# Altium footprint library WR-MPC3.PcbLib: 235 footprints (part 7 of 15)
Each footprint in its own frame and in the unit in brackets; x right, y up, seen from the top. Pads: shape width x height; smd on the part's side, far side on the other; paste and mask are expansions set on the pad; w line width, h text height; cw(c..) or ccw(c..) is an arc to the next point about the centre after c.
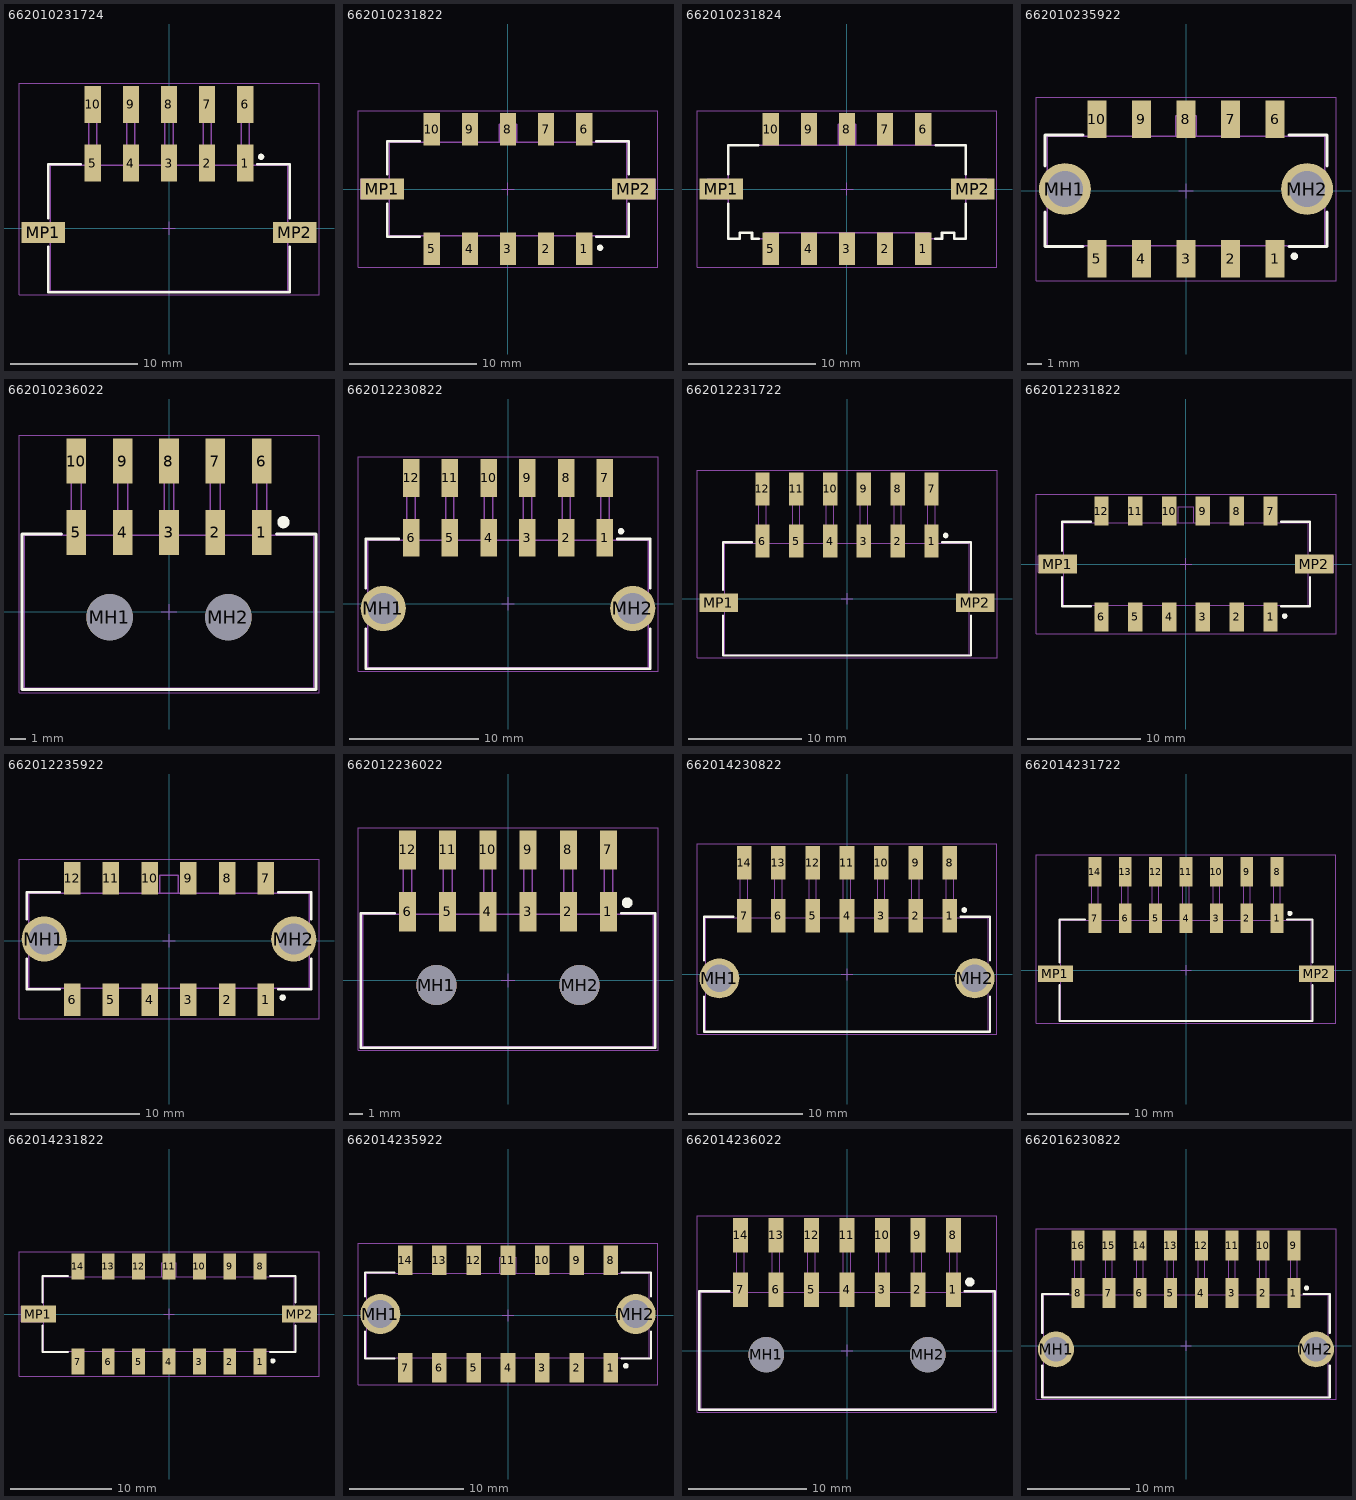
[diagram p6: the footprints below, top view; thin cyan lines are the x and y axes]

## 662010231724 [mm] "3.00mm SMT Male Dual Row Angled Header with SMT Solder Tab, 10p"
height 8.26
pads (12):
  rect 1.27x2.92 smd: 1(6,5.13) 2(3,5.13) 3(0,5.13) 4(-3,5.13) 5(-6,5.13) 6(6,9.75) 7(3,9.75) 8(0,9.75) 9(-3,9.75) 10(-6,9.75)
  rect 3.43x1.65 smd: MP1(-9.895,-0.35) MP2(9.895,-0.35)
Top Overlay:
  circle w0.25: c7.25,5.625 r0.125
  lines w0.2: -9.5,-1.475 -9.5,-5.025 9.5,-5.025 9.5,-1.475 ; -9.5,0.775 -9.5,5.025 -6.95,5.025 ; 6.95,5.025 9.5,5.025 9.5,0.775
Top Designator:
  text ".Designator" at -7.498,-0.5 h1.5
Top Component Outline:
  lines w0.1: -9.35,-1.1 -11.05,-1.1 -11.05,0.4 -9.35,0.4 ; -6.32,4.95 -6.32,10.95 -5.68,10.95 -5.68,4.95 ; -6.32,6.3 -5.68,6.3 ; -3.32,4.95 -3.32,10.95 -2.68,10.95 -2.68,4.95 ; -3.32,6.3 -2.68,6.3 ; -0.32,4.95 -0.32,10.95 0.32,10.95 0.32,4.95 ; -0.32,6.3 0.32,6.3 ; 2.68,4.95 2.68,10.95 3.32,10.95 3.32,4.95 ; 2.68,6.3 3.32,6.3 ; 5.68,4.95 5.68,10.95 6.32,10.95 6.32,4.95 ; 5.68,6.3 6.32,6.3 ; 9.35,-1.1 11.05,-1.1 11.05,0.4 9.35,0.4 ; -9.35,-4.95 -9.35,4.95 9.35,4.95 9.35,-4.95 -9.35,-4.95
Top 3D Body:
  lines w0.1: -9.35,-1.1 -11.05,-1.1 -11.05,0.4 -9.35,0.4 ; -6.32,4.95 -6.32,10.95 -5.68,10.95 -5.68,4.95 ; -6.32,6.3 -5.68,6.3 ; -3.32,4.95 -3.32,10.95 -2.68,10.95 -2.68,4.95 ; -3.32,6.3 -2.68,6.3 ; -0.32,4.95 -0.32,10.95 0.32,10.95 0.32,4.95 ; -0.32,6.3 0.32,6.3 ; 2.68,4.95 2.68,10.95 3.32,10.95 3.32,4.95 ; 2.68,6.3 3.32,6.3 ; 5.68,4.95 5.68,10.95 6.32,10.95 6.32,4.95 ; 5.68,6.3 6.32,6.3 ; 9.35,-1.1 11.05,-1.1 11.05,0.4 9.35,0.4 ; -9.35,-4.95 9.35,-4.95 9.35,4.95 -9.35,4.95 -9.35,-4.95
Top Courtyard:
  lines w0.05: -11.81,-5.225 11.81,-5.225 11.81,11.41 -11.81,11.41 -11.81,-5.225
Top Component Center:
  lines w0.05: -0.5,0 0.5,0 ; 0,-0.5 0,0.5
3D body "662010231724.stp": height 8.76, standoff 0, extent -11.05,-4.95 11.05,10.95

## 662010231822 [mm] "3.00mm SMT Male Dual Row Vertical Header with SMT Solder Tab, 10p"
height 9.9
pads (12):
  rect 1.27x2.54 smd: 1(6,-4.7) 2(3,-4.7) 3(0,-4.7) 4(-3,-4.7) 5(-6,-4.7) 6(6,4.7) 7(3,4.7) 8(0,4.7) 9(-3,4.7) 10(-6,4.7)
  rect 3.43x1.65 smd: MP1(-9.895,0) MP2(9.895,0)
Top Overlay:
  circle w0.25: c7.25,-4.625 r0.125
  lines w0.2: -9.5,-1.155 -9.5,-3.755 -6.95,-3.755 ; -9.5,1.155 -9.5,3.755 -6.95,3.755 ; 6.95,-3.755 9.5,-3.755 9.5,-1.155 ; 6.95,3.755 9.5,3.755 9.5,1.155
Top Designator:
  text ".Designator" at -7.498,-0.5 h1.5
Top Component Outline:
  lines w0.1: -9.35,-0.75 -11.6,-0.75 -11.6,0.75 -9.35,0.75 ; -6.32,-3.68 -6.32,-5.698 -5.68,-5.698 -5.68,-3.68 ; -6.32,3.68 -6.32,5.698 -5.68,5.698 -5.68,3.68 ; -3.32,-3.68 -3.32,-5.698 -2.68,-5.698 -2.68,-3.68 ; -3.32,3.68 -3.32,5.698 -2.68,5.698 -2.68,3.68 ; -0.7,3.68 -0.7,5.08 0.7,5.08 0.7,3.68 ; -0.32,-3.68 -0.32,-5.698 0.32,-5.698 0.32,-3.68 ; -0.32,3.68 -0.32,5.698 0.32,5.698 0.32,3.68 ; 2.68,-3.68 2.68,-5.698 3.32,-5.698 3.32,-3.68 ; 2.68,3.68 2.68,5.698 3.32,5.698 3.32,3.68 ; 5.68,-3.68 5.68,-5.698 6.32,-5.698 6.32,-3.68 ; 5.68,3.68 5.68,5.698 6.32,5.698 6.32,3.68 ; 9.35,-0.75 11.6,-0.75 11.6,0.75 9.35,0.75 ; -9.35,-3.68 9.35,-3.68 9.35,3.68 -9.35,3.68 -9.35,-3.68
Top 3D Body:
  lines w0.1: -9.35,-0.75 -11.6,-0.75 -11.6,0.75 -9.35,0.75 ; -6.32,-3.68 -6.32,-5.698 -5.68,-5.698 -5.68,-3.68 ; -6.32,3.68 -6.32,5.698 -5.68,5.698 -5.68,3.68 ; -3.32,-3.68 -3.32,-5.698 -2.68,-5.698 -2.68,-3.68 ; -3.32,3.68 -3.32,5.698 -2.68,5.698 -2.68,3.68 ; -0.7,3.68 -0.7,5.08 0.7,5.08 0.7,3.68 ; -0.32,-3.68 -0.32,-5.698 0.32,-5.698 0.32,-3.68 ; -0.32,3.68 -0.32,5.698 0.32,5.698 0.32,3.68 ; 2.68,-3.68 2.68,-5.698 3.32,-5.698 3.32,-3.68 ; 2.68,3.68 2.68,5.698 3.32,5.698 3.32,3.68 ; 5.68,-3.68 5.68,-5.698 6.32,-5.698 6.32,-3.68 ; 5.68,3.68 5.68,5.698 6.32,5.698 6.32,3.68 ; 9.35,-0.75 11.6,-0.75 11.6,0.75 9.35,0.75 ; -9.35,-3.68 9.35,-3.68 9.35,3.68 -9.35,3.68 -9.35,-3.68
Top Courtyard:
  lines w0.05: -11.81,-6.17 -11.81,6.17 11.81,6.17 11.81,-6.17 -11.81,-6.17
Top Component Center:
  lines w0.05: -0.5,0 0.5,0 ; 0,-0.5 0,0.5
3D body "662010231822.stp": height 9.93, standoff 0.03, extent -11.6,-5.698 11.6,5.698

## 662010231824 [mm] "3.00mm SMT Male Dual Row Vertical Header with SMT Solder Tab, 10p"
height 9.9
pads (12):
  rect 1.27x2.54 smd: 1(6,-4.7) 2(3,-4.7) 3(0,-4.7) 4(-3,-4.7) 5(-6,-4.7) 6(6,4.7) 7(3,4.7) 8(0,4.7) 9(-3,4.7) 10(-6,4.7)
  rect 3.43x1.65 smd: MP1(-9.895,0) MP2(9.895,0)
Top Overlay:
  lines w0.2: -9.35,-1.17 -9.35,-3.93 -8.45,-3.93 -8.45,-3.43 -7.48,-3.43 -7.48,-3.93 -6.95,-3.93 ; -9.35,1.18 -9.35,3.43 -7.003,3.43 ; 6.95,-3.93 7.48,-3.93 7.48,-3.43 8.45,-3.43 8.45,-3.93 9.35,-3.93 9.35,-1.17 ; 7.003,3.43 9.35,3.43 9.35,1.18
Top Designator:
  text ".Designator" at -7.498,-0.5 h1.5
Top Component Outline:
  lines w0.1: -9.35,-0.75 -11.05,-0.75 -11.05,0.75 -9.35,0.75 ; -6.32,-3.43 -6.32,-5.698 -5.68,-5.698 -5.68,-3.43 ; -6.32,3.43 -6.32,5.698 -5.68,5.698 -5.68,3.43 ; -3.32,-3.43 -3.32,-5.698 -2.68,-5.698 -2.68,-3.43 ; -3.32,3.43 -3.32,5.698 -2.68,5.698 -2.68,3.43 ; -0.7,3.43 -0.7,5.08 0.7,5.08 0.7,3.43 ; -0.32,-3.43 -0.32,-5.698 0.32,-5.698 0.32,-3.43 ; -0.32,3.43 -0.32,5.698 0.32,5.698 0.32,3.43 ; 2.68,-3.43 2.68,-5.698 3.32,-5.698 3.32,-3.43 ; 2.68,3.43 2.68,5.698 3.32,5.698 3.32,3.43 ; 5.68,-3.43 5.68,-5.698 6.32,-5.698 6.32,-3.43 ; 5.68,3.43 5.68,5.698 6.32,5.698 6.32,3.43 ; 9.35,-0.75 11.05,-0.75 11.05,0.75 9.35,0.75 ; -9.35,-3.93 -9.35,3.43 9.35,3.43 9.35,-3.93 8.45,-3.93 8.45,-3.43 7.48,-3.43 7.48,-3.93 6.48,-3.93 6.48,-3.43 -6.48,-3.43 -6.48,-3.93 -7.48,-3.93 -7.48,-3.43 -8.45,-3.43 -8.45,-3.93 -9.35,-3.93
Top Courtyard:
  lines w0.05: -11.81,-6.17 11.81,-6.17 11.81,6.17 -11.81,6.17 -11.81,-6.17
Top Component Center:
  lines w0.05: -0.5,0 0.5,0 ; 0,-0.5 0,0.5
3D body "662010231824.stp": height 9.93, standoff 0.03, extent -11.045,-5.698 11.045,5.698

## 662010235922 [mm] "Dual row SMT Vertical header With TH metal clip 10p"
height 9.9
pads (12):
  rect 1.27x2.54 smd: 1(6,-4.57) 2(3,-4.57) 3(0,-4.57) 4(-3,-4.57) 5(-6,-4.57) 6(6,4.83) 7(3,4.83) 8(0,4.83) 9(-3,4.83) 10(-6,4.83)
  round 3.5 hole 2.41: MH1(-8.16,0.13) MH2(8.16,0.13)
Top Overlay:
  circle w0.25: c7.3,-4.4 r0.125
  lines w0.2: -9.5,-1.405 -9.5,-3.755 -6.95,-3.755 ; -9.5,1.665 -9.5,3.755 -6.95,3.755 ; 6.95,-3.755 9.5,-3.755 9.5,-1.405 ; 6.95,3.755 9.5,3.755 9.5,1.665
Top Designator:
  text ".Designator" at -7.498,-0.5 h1.5
Top Component Outline:
  lines w0.1: -6.32,-3.68 -6.32,-5.5 -5.68,-5.5 -5.68,-3.68 ; -6.32,3.68 -6.32,5.9 -5.68,5.9 -5.68,3.68 ; -3.32,-3.68 -3.32,-5.5 -2.68,-5.5 -2.68,-3.68 ; -3.32,3.68 -3.32,5.9 -2.68,5.9 -2.68,3.68 ; -0.7,3.68 -0.7,5.08 0.7,5.08 0.7,3.68 ; -0.32,-3.68 -0.32,-5.5 0.32,-5.5 0.32,-3.68 ; -0.32,3.68 -0.32,5.9 0.32,5.9 0.32,3.68 ; 2.68,-3.68 2.68,-5.5 3.32,-5.5 3.32,-3.68 ; 2.68,3.68 2.68,5.9 3.32,5.9 3.32,3.68 ; 5.68,-3.68 5.68,-5.5 6.32,-5.5 6.32,-3.68 ; 5.68,3.68 5.68,5.9 6.32,5.9 6.32,3.68 ; -9.35,-3.68 -9.35,3.68 9.35,3.68 9.35,-3.68 -9.35,-3.68
Top 3D Body:
  lines w0.1: -6.32,-3.68 -6.32,-5.5 -5.68,-5.5 -5.68,-3.68 ; -6.32,3.68 -6.32,5.9 -5.68,5.9 -5.68,3.68 ; -3.32,-3.68 -3.32,-5.5 -2.68,-5.5 -2.68,-3.68 ; -3.32,3.68 -3.32,5.9 -2.68,5.9 -2.68,3.68 ; -0.7,3.68 -0.7,5.08 0.7,5.08 0.7,3.68 ; -0.32,-3.68 -0.32,-5.5 0.32,-5.5 0.32,-3.68 ; -0.32,3.68 -0.32,5.9 0.32,5.9 0.32,3.68 ; 2.68,-3.68 2.68,-5.5 3.32,-5.5 3.32,-3.68 ; 2.68,3.68 2.68,5.9 3.32,5.9 3.32,3.68 ; 5.68,-3.68 5.68,-5.5 6.32,-5.5 6.32,-3.68 ; 5.68,3.68 5.68,5.9 6.32,5.9 6.32,3.68 ; -9.35,-3.68 -9.35,3.68 9.35,3.68 9.35,-3.68 -9.35,-3.68
Top Courtyard:
  lines w0.05: -10.11,-6.04 -10.11,6.3 10.11,6.3 10.11,-6.04 -10.11,-6.04
Top Component Center:
  lines w0.05: -0.5,0 0.5,0 ; 0,-0.5 0,0.5
3D body "662010235922.stp": height 9.92, standoff -3.08, extent -9.35,-5.5 9.35,5.9

## 662010236022 [mm] "3.00mm SMT Male Dual Row Angled Header with Plastic Pegs, 10p"
height 8.26
pads (12):
  rect 1.27x2.92 smd: 1(6,5.13) 2(3,5.13) 3(0,5.13) 4(-3,5.13) 5(-6,5.13) 6(6,9.75) 7(3,9.75) 8(0,9.75) 9(-3,9.75) 10(-6,9.75)
  round 3 hole 3 unplated: MH1(-3.84,-0.35) MH2(3.84,-0.35)
Top Overlay:
  circle w0.4: c7.4,5.8 r0.2
  lines w0.2: -6.95,5.025 -9.5,5.025 -9.5,-5.025 9.5,-5.025 9.5,5.025 6.95,5.025
Top Designator:
  text ".Designator" at -7.498,-0.5 h1.5
Top Component Outline:
  lines w0.1: -6.32,4.95 -6.32,10.95 -5.68,10.95 -5.68,4.95 ; -6.32,6.3 -5.68,6.3 ; -3.32,4.95 -3.32,10.95 -2.68,10.95 -2.68,4.95 ; -3.32,6.3 -2.68,6.3 ; -0.32,4.95 -0.32,10.95 0.32,10.95 0.32,4.95 ; -0.32,6.3 0.32,6.3 ; 2.68,4.95 2.68,10.95 3.32,10.95 3.32,4.95 ; 2.68,6.3 3.32,6.3 ; 5.68,4.95 5.68,10.95 6.32,10.95 6.32,4.95 ; 5.68,6.3 6.32,6.3 ; -9.35,-4.95 9.35,-4.95 9.35,4.95 -9.35,4.95 -9.35,-4.95
Top 3D Body:
  lines w0.1: -6.32,4.95 -6.32,10.95 -5.68,10.95 -5.68,4.95 ; -6.32,6.3 -5.68,6.3 ; -3.32,4.95 -3.32,10.95 -2.68,10.95 -2.68,4.95 ; -3.32,6.3 -2.68,6.3 ; -0.32,4.95 -0.32,10.95 0.32,10.95 0.32,4.95 ; -0.32,6.3 0.32,6.3 ; 2.68,4.95 2.68,10.95 3.32,10.95 3.32,4.95 ; 2.68,6.3 3.32,6.3 ; 5.68,4.95 5.68,10.95 6.32,10.95 6.32,4.95 ; 5.68,6.3 6.32,6.3 ; -9.35,-4.95 9.35,-4.95 9.35,4.95 -9.35,4.95 -9.35,-4.95
Top Courtyard:
  lines w0.05: -9.7,-5.225 9.7,-5.225 9.7,11.41 -9.7,11.41 -9.7,-5.225
Top Component Center:
  lines w0.05: -0.5,0 0.5,0 ; 0,-0.5 0,0.5
3D body "662010236022.stp": height 8.79, standoff -3.17, extent -9.35,-4.95 9.35,10.95

## 662012230822 [mm] "Dual row SMT Right angle header With TH Metal Clip 12p"
height 8.76
pads (14):
  rect 1.27x2.92 smd: 1(7.5,5.13) 2(4.5,5.13) 3(1.5,5.13) 4(-1.5,5.13) 5(-4.5,5.13) 6(-7.5,5.13) 7(7.5,9.75) 8(4.5,9.75) 9(1.5,9.75) 10(-1.5,9.75) 11(-4.5,9.75) 12(-7.5,9.75)
  round 3.5 hole 2.41: MH1(-9.66,-0.35) MH2(9.66,-0.35)
Top Overlay:
  circle w0.25: c8.75,5.625 r0.125
  lines w0.2: -11,-1.925 -11,-5.025 11,-5.025 11,-1.925 ; -11,1.225 -11,5.025 -8.45,5.025 ; 8.45,5.025 11,5.025 11,1.225
Top Designator:
  text ".Designator" at -7.498,-0.5 h1.5
Top Component Outline:
  lines w0.1: -7.82,4.95 -7.82,10.95 -7.18,10.95 -7.18,4.95 ; -7.82,6.3 -7.18,6.3 ; -4.82,4.95 -4.82,10.95 -4.18,10.95 -4.18,4.95 ; -4.82,6.3 -4.18,6.3 ; -1.82,4.95 -1.82,10.95 -1.18,10.95 -1.18,4.95 ; -1.82,6.3 -1.18,6.3 ; 1.18,4.95 1.18,10.95 1.82,10.95 1.82,4.95 ; 1.18,6.3 1.82,6.3 ; 4.18,4.95 4.18,10.95 4.82,10.95 4.82,4.95 ; 4.18,6.3 4.82,6.3 ; 7.18,4.95 7.18,10.95 7.82,10.95 7.82,4.95 ; 7.18,6.3 7.82,6.3 ; -10.85,-4.95 -10.85,4.95 10.85,4.95 10.85,-4.95 -10.85,-4.95
Top 3D Body:
  lines w0.1: -7.82,4.95 -7.82,10.95 -7.18,10.95 -7.18,4.95 ; -7.82,6.3 -7.18,6.3 ; -4.82,4.95 -4.82,10.95 -4.18,10.95 -4.18,4.95 ; -4.82,6.3 -4.18,6.3 ; -1.82,4.95 -1.82,10.95 -1.18,10.95 -1.18,4.95 ; -1.82,6.3 -1.18,6.3 ; 1.18,4.95 1.18,10.95 1.82,10.95 1.82,4.95 ; 1.18,6.3 1.82,6.3 ; 4.18,4.95 4.18,10.95 4.82,10.95 4.82,4.95 ; 4.18,6.3 4.82,6.3 ; 7.18,4.95 7.18,10.95 7.82,10.95 7.82,4.95 ; 7.18,6.3 7.82,6.3 ; -10.85,-4.95 -10.85,4.95 10.85,4.95 10.85,-4.95 -10.85,-4.95
Top Courtyard:
  lines w0.05: -11.61,-5.225 11.61,-5.225 11.61,11.41 -11.61,11.41 -11.61,-5.225
Top Component Center:
  lines w0.05: -0.5,0 0.5,0 ; 0,-0.5 0,0.5
3D body "662012230822.stp": height 8.78, standoff -3.08, extent -10.85,-4.95 10.85,10.95

## 662012231722 [mm] "3.00mm SMT Male Dual Row Angled Header with SMT Solder Tab, 12p"
height 8.26
pads (14):
  rect 1.27x2.92 smd: 1(7.5,5.13) 2(4.5,5.13) 3(1.5,5.13) 4(-1.5,5.13) 5(-4.5,5.13) 6(-7.5,5.13) 7(7.5,9.75) 8(4.5,9.75) 9(1.5,9.75) 10(-1.5,9.75) 11(-4.5,9.75) 12(-7.5,9.75)
  rect 3.43x1.65 smd: MP1(-11.395,-0.35) MP2(11.395,-0.35)
Top Overlay:
  circle w0.25: c8.75,5.625 r0.125
  lines w0.2: -11,-1.475 -11,-5.025 11,-5.025 11,-1.475 ; -11,0.775 -11,5.025 -8.45,5.025 ; 8.45,5.025 11,5.025 11,0.775
Top Designator:
  text ".Designator" at -7.498,-0.5 h1.5
Top Component Outline:
  lines w0.1: -10.85,-1.1 -12.55,-1.1 -12.55,0.4 -10.85,0.4 ; -7.82,4.95 -7.82,10.95 -7.18,10.95 -7.18,4.95 ; -7.82,6.3 -7.18,6.3 ; -4.82,4.95 -4.82,10.95 -4.18,10.95 -4.18,4.95 ; -4.82,6.3 -4.18,6.3 ; -1.82,4.95 -1.82,10.95 -1.18,10.95 -1.18,4.95 ; -1.82,6.3 -1.18,6.3 ; 1.18,4.95 1.18,10.95 1.82,10.95 1.82,4.95 ; 1.18,6.3 1.82,6.3 ; 4.18,4.95 4.18,10.95 4.82,10.95 4.82,4.95 ; 4.18,6.3 4.82,6.3 ; 7.18,4.95 7.18,10.95 7.82,10.95 7.82,4.95 ; 7.18,6.3 7.82,6.3 ; 10.85,-1.1 12.55,-1.1 12.55,0.4 10.85,0.4 ; -10.85,-4.95 10.85,-4.95 10.85,4.95 -10.85,4.95 -10.85,-4.95
Top 3D Body:
  lines w0.1: -10.85,-1.1 -12.55,-1.1 -12.55,0.4 -10.85,0.4 ; -7.82,4.95 -7.82,10.95 -7.18,10.95 -7.18,4.95 ; -7.82,6.3 -7.18,6.3 ; -4.82,4.95 -4.82,10.95 -4.18,10.95 -4.18,4.95 ; -4.82,6.3 -4.18,6.3 ; -1.82,4.95 -1.82,10.95 -1.18,10.95 -1.18,4.95 ; -1.82,6.3 -1.18,6.3 ; 1.18,4.95 1.18,10.95 1.82,10.95 1.82,4.95 ; 1.18,6.3 1.82,6.3 ; 4.18,4.95 4.18,10.95 4.82,10.95 4.82,4.95 ; 4.18,6.3 4.82,6.3 ; 7.18,4.95 7.18,10.95 7.82,10.95 7.82,4.95 ; 7.18,6.3 7.82,6.3 ; 10.85,-1.1 12.55,-1.1 12.55,0.4 10.85,0.4 ; -10.85,-4.95 10.85,-4.95 10.85,4.95 -10.85,4.95 -10.85,-4.95
Top Courtyard:
  lines w0.05: -13.31,-5.225 13.31,-5.225 13.31,11.41 -13.31,11.41 -13.31,-5.225
Top Component Center:
  lines w0.05: -0.5,0 0.5,0 ; 0,-0.5 0,0.5
3D body "662012231722.stp": height 8.79, standoff 0.03, extent -12.55,-4.95 12.55,10.95

## 662012231822 [mm] "3.00mm SMT Male Dual Row Vertical Header with SMT Solder Tab, 12p"
height 9.9
pads (14):
  rect 1.27x2.54 smd: 1(7.5,-4.7) 2(4.5,-4.7) 3(1.5,-4.7) 4(-1.5,-4.7) 5(-4.5,-4.7) 6(-7.5,-4.7) 7(7.5,4.7) 8(4.5,4.7) 9(1.5,4.7) 10(-1.5,4.7) 11(-4.5,4.7) 12(-7.5,4.7)
  rect 3.43x1.65 smd: MP1(-11.395,0) MP2(11.395,0)
Top Overlay:
  circle w0.25: c8.75,-4.625 r0.125
  lines w0.2: -11,-1.155 -11,-3.755 -8.45,-3.755 ; -11,1.155 -11,3.755 -8.45,3.755 ; 8.45,-3.755 11,-3.755 11,-1.155 ; 8.45,3.755 11,3.755 11,1.155
Top Designator:
  text ".Designator" at -7.498,-0.5 h1.5
Top Component Outline:
  lines w0.1: -10.85,-0.75 -13.1,-0.75 -13.1,0.75 -10.85,0.75 ; -7.82,-3.68 -7.82,-5.698 -7.18,-5.698 -7.18,-3.68 ; -7.82,3.68 -7.82,5.698 -7.18,5.698 -7.18,3.68 ; -4.82,-3.68 -4.82,-5.698 -4.18,-5.698 -4.18,-3.68 ; -4.82,3.68 -4.82,5.698 -4.18,5.698 -4.18,3.68 ; -1.82,-3.68 -1.82,-5.698 -1.18,-5.698 -1.18,-3.68 ; -1.82,3.68 -1.82,5.698 -1.18,5.698 -1.18,3.68 ; -0.7,3.68 -0.7,5.08 0.7,5.08 0.7,3.68 ; 1.18,-3.68 1.18,-5.698 1.82,-5.698 1.82,-3.68 ; 1.18,3.68 1.18,5.698 1.82,5.698 1.82,3.68 ; 4.18,-3.68 4.18,-5.698 4.82,-5.698 4.82,-3.68 ; 4.18,3.68 4.18,5.698 4.82,5.698 4.82,3.68 ; 7.18,-3.68 7.18,-5.698 7.82,-5.698 7.82,-3.68 ; 7.18,3.68 7.18,5.698 7.82,5.698 7.82,3.68 ; 10.85,-0.75 13.1,-0.75 13.1,0.75 10.85,0.75 ; -10.85,-3.68 10.85,-3.68 10.85,3.68 -10.85,3.68 -10.85,-3.68
Top 3D Body:
  lines w0.1: -10.85,-0.75 -13.1,-0.75 -13.1,0.75 -10.85,0.75 ; -7.82,-3.68 -7.82,-5.698 -7.18,-5.698 -7.18,-3.68 ; -7.82,3.68 -7.82,5.698 -7.18,5.698 -7.18,3.68 ; -4.82,-3.68 -4.82,-5.698 -4.18,-5.698 -4.18,-3.68 ; -4.82,3.68 -4.82,5.698 -4.18,5.698 -4.18,3.68 ; -1.82,-3.68 -1.82,-5.698 -1.18,-5.698 -1.18,-3.68 ; -1.82,3.68 -1.82,5.698 -1.18,5.698 -1.18,3.68 ; -0.7,3.68 -0.7,5.08 0.7,5.08 0.7,3.68 ; 1.18,-3.68 1.18,-5.698 1.82,-5.698 1.82,-3.68 ; 1.18,3.68 1.18,5.698 1.82,5.698 1.82,3.68 ; 4.18,-3.68 4.18,-5.698 4.82,-5.698 4.82,-3.68 ; 4.18,3.68 4.18,5.698 4.82,5.698 4.82,3.68 ; 7.18,-3.68 7.18,-5.698 7.82,-5.698 7.82,-3.68 ; 7.18,3.68 7.18,5.698 7.82,5.698 7.82,3.68 ; 10.85,-0.75 13.1,-0.75 13.1,0.75 10.85,0.75 ; -10.85,-3.68 10.85,-3.68 10.85,3.68 -10.85,3.68 -10.85,-3.68
Top Courtyard:
  lines w0.05: -13.31,-6.17 -13.31,6.17 13.31,6.17 13.31,-6.17 -13.31,-6.17
Top Component Center:
  lines w0.05: -0.5,0 0.5,0 ; 0,-0.5 0,0.5
3D body "662012231822.stp": height 9.93, standoff 0.03, extent -13.1,-5.698 13.1,5.698

## 662012235922 [mm] "Dual row SMT Vertical header With TH metal clip 12p"
height 9.9
pads (14):
  rect 1.27x2.54 smd: 1(7.5,-4.57) 2(4.5,-4.57) 3(1.5,-4.57) 4(-1.5,-4.57) 5(-4.5,-4.57) 6(-7.5,-4.57) 7(7.5,4.83) 8(4.5,4.83) 9(1.5,4.83) 10(-1.5,4.83) 11(-4.5,4.83) 12(-7.5,4.83)
  round 3.5 hole 2.41: MH1(-9.66,0.13) MH2(9.66,0.13)
Top Overlay:
  circle w0.25: c8.8,-4.4 r0.125
  lines w0.2: -11,-1.405 -11,-3.755 -8.45,-3.755 ; -11,1.665 -11,3.755 -8.45,3.755 ; 8.45,-3.755 11,-3.755 11,-1.405 ; 8.45,3.755 11,3.755 11,1.665
Top Designator:
  text ".Designator" at -7.498,-0.5 h1.5
Top Component Outline:
  lines w0.1: -7.82,-3.68 -7.82,-5.5 -7.18,-5.5 -7.18,-3.68 ; -7.82,3.68 -7.82,5.9 -7.18,5.9 -7.18,3.68 ; -4.82,-3.68 -4.82,-5.5 -4.18,-5.5 -4.18,-3.68 ; -4.82,3.68 -4.82,5.9 -4.18,5.9 -4.18,3.68 ; -1.82,-3.68 -1.82,-5.5 -1.18,-5.5 -1.18,-3.68 ; -1.82,3.68 -1.82,5.9 -1.18,5.9 -1.18,3.68 ; -0.7,3.68 -0.7,5.08 0.7,5.08 0.7,3.68 ; 1.18,-3.68 1.18,-5.5 1.82,-5.5 1.82,-3.68 ; 1.18,3.68 1.18,5.9 1.82,5.9 1.82,3.68 ; 4.18,-3.68 4.18,-5.5 4.82,-5.5 4.82,-3.68 ; 4.18,3.68 4.18,5.9 4.82,5.9 4.82,3.68 ; 7.18,-3.68 7.18,-5.5 7.82,-5.5 7.82,-3.68 ; 7.18,3.68 7.18,5.9 7.82,5.9 7.82,3.68 ; -10.85,-3.68 -10.85,3.68 10.85,3.68 10.85,-3.68 -10.85,-3.68
Top 3D Body:
  lines w0.1: -7.82,-3.68 -7.82,-5.5 -7.18,-5.5 -7.18,-3.68 ; -7.82,3.68 -7.82,5.9 -7.18,5.9 -7.18,3.68 ; -4.82,-3.68 -4.82,-5.5 -4.18,-5.5 -4.18,-3.68 ; -4.82,3.68 -4.82,5.9 -4.18,5.9 -4.18,3.68 ; -1.82,-3.68 -1.82,-5.5 -1.18,-5.5 -1.18,-3.68 ; -1.82,3.68 -1.82,5.9 -1.18,5.9 -1.18,3.68 ; -0.7,3.68 -0.7,5.08 0.7,5.08 0.7,3.68 ; 1.18,-3.68 1.18,-5.5 1.82,-5.5 1.82,-3.68 ; 1.18,3.68 1.18,5.9 1.82,5.9 1.82,3.68 ; 4.18,-3.68 4.18,-5.5 4.82,-5.5 4.82,-3.68 ; 4.18,3.68 4.18,5.9 4.82,5.9 4.82,3.68 ; 7.18,-3.68 7.18,-5.5 7.82,-5.5 7.82,-3.68 ; 7.18,3.68 7.18,5.9 7.82,5.9 7.82,3.68 ; -10.85,-3.68 10.85,-3.68 10.85,3.68 -10.85,3.68 -10.85,-3.68
Top Courtyard:
  lines w0.05: -11.61,-6.04 11.61,-6.04 11.61,6.3 -11.61,6.3 -11.61,-6.04
Top Component Center:
  lines w0.05: -0.5,0 0.5,0 ; 0,-0.5 0,0.5
3D body "662012235922.stp": height 9.92, standoff -3.08, extent -10.85,-5.5 10.85,5.9

## 662012236022 [mm] "3.00mm SMT Male Dual Row Angled Header with Plastic Pegs, 12p"
height 8.26
pads (14):
  rect 1.27x2.92 smd: 1(7.5,5.13) 2(4.5,5.13) 3(1.5,5.13) 4(-1.5,5.13) 5(-4.5,5.13) 6(-7.5,5.13) 7(7.5,9.75) 8(4.5,9.75) 9(1.5,9.75) 10(-1.5,9.75) 11(-4.5,9.75) 12(-7.5,9.75)
  round 3 hole 3 unplated: MH1(-5.34,-0.35) MH2(5.34,-0.35)
Top Overlay:
  circle w0.4: c8.9,5.8 r0.2
  lines w0.2: -8.45,5.025 -11,5.025 -11,-5.025 11,-5.025 11,5.025 8.45,5.025
Top Designator:
  text ".Designator" at -7.498,-0.5 h1.5
Top Component Outline:
  lines w0.1: -7.82,4.95 -7.82,10.95 -7.18,10.95 -7.18,4.95 ; -7.82,6.3 -7.18,6.3 ; -4.82,4.95 -4.82,10.95 -4.18,10.95 -4.18,4.95 ; -4.82,6.3 -4.18,6.3 ; -1.82,4.95 -1.82,10.95 -1.18,10.95 -1.18,4.95 ; -1.82,6.3 -1.18,6.3 ; 1.18,4.95 1.18,10.95 1.82,10.95 1.82,4.95 ; 1.18,6.3 1.82,6.3 ; 4.18,4.95 4.18,10.95 4.82,10.95 4.82,4.95 ; 4.18,6.3 4.82,6.3 ; 7.18,4.95 7.18,10.95 7.82,10.95 7.82,4.95 ; 7.18,6.3 7.82,6.3 ; -10.85,-4.95 10.85,-4.95 10.85,4.95 -10.85,4.95 -10.85,-4.95
Top 3D Body:
  lines w0.1: -7.82,4.95 -7.82,10.95 -7.18,10.95 -7.18,4.95 ; -7.82,6.3 -7.18,6.3 ; -4.82,4.95 -4.82,10.95 -4.18,10.95 -4.18,4.95 ; -4.82,6.3 -4.18,6.3 ; -1.82,4.95 -1.82,10.95 -1.18,10.95 -1.18,4.95 ; -1.82,6.3 -1.18,6.3 ; 1.18,4.95 1.18,10.95 1.82,10.95 1.82,4.95 ; 1.18,6.3 1.82,6.3 ; 4.18,4.95 4.18,10.95 4.82,10.95 4.82,4.95 ; 4.18,6.3 4.82,6.3 ; 7.18,4.95 7.18,10.95 7.82,10.95 7.82,4.95 ; 7.18,6.3 7.82,6.3 ; -10.85,-4.95 10.85,-4.95 10.85,4.95 -10.85,4.95 -10.85,-4.95
Top Courtyard:
  lines w0.05: -11.2,-5.225 11.2,-5.225 11.2,11.41 -11.2,11.41 -11.2,-5.225
Top Component Center:
  lines w0.05: -0.5,0 0.5,0 ; 0,-0.5 0,0.5
3D body "662012236022.stp": height 8.79, standoff -3.17, extent -10.85,-4.95 10.85,10.95

## 662014230822 [mm] "Dual row SMT Right angle header With TH Metal Clip 14p"
height 8.76
pads (16):
  rect 1.27x2.92 smd: 1(9,5.13) 2(6,5.13) 3(3,5.13) 4(0,5.13) 5(-3,5.13) 6(-6,5.13) 7(-9,5.13) 8(9,9.75) 9(6,9.75) 10(3,9.75) 11(0,9.75) 12(-3,9.75) 13(-6,9.75) 14(-9,9.75)
  round 3.5 hole 2.41: MH1(-11.16,-0.35) MH2(11.16,-0.35)
Top Overlay:
  circle w0.25: c10.25,5.625 r0.125
  lines w0.2: -12.5,-1.925 -12.5,-5.025 12.5,-5.025 12.5,-1.925 ; -12.5,1.225 -12.5,5.025 -9.95,5.025 ; 9.95,5.025 12.5,5.025 12.5,1.225
Top Designator:
  text ".Designator" at -7.498,-0.5 h1.5
Top Component Outline:
  lines w0.1: -9.32,4.95 -9.32,10.95 -8.68,10.95 -8.68,4.95 ; -9.32,6.3 -8.68,6.3 ; -6.32,4.95 -6.32,10.95 -5.68,10.95 -5.68,4.95 ; -6.32,6.3 -5.68,6.3 ; -3.32,4.95 -3.32,10.95 -2.68,10.95 -2.68,4.95 ; -3.32,6.3 -2.68,6.3 ; -0.32,4.95 -0.32,10.95 0.32,10.95 0.32,4.95 ; -0.32,6.3 0.32,6.3 ; 2.68,4.95 2.68,10.95 3.32,10.95 3.32,4.95 ; 2.68,6.3 3.32,6.3 ; 5.68,4.95 5.68,10.95 6.32,10.95 6.32,4.95 ; 5.68,6.3 6.32,6.3 ; 8.68,4.95 8.68,10.95 9.32,10.95 9.32,4.95 ; 8.68,6.3 9.32,6.3 ; -12.35,-4.95 -12.35,4.95 12.35,4.95 12.35,-4.95 -12.35,-4.95
Top 3D Body:
  lines w0.1: -9.32,4.95 -9.32,10.95 -8.68,10.95 -8.68,4.95 ; -9.32,6.3 -8.68,6.3 ; -6.32,4.95 -6.32,10.95 -5.68,10.95 -5.68,4.95 ; -6.32,6.3 -5.68,6.3 ; -3.32,4.95 -3.32,10.95 -2.68,10.95 -2.68,4.95 ; -3.32,6.3 -2.68,6.3 ; -0.32,4.95 -0.32,10.95 0.32,10.95 0.32,4.95 ; -0.32,6.3 0.32,6.3 ; 2.68,4.95 2.68,10.95 3.32,10.95 3.32,4.95 ; 2.68,6.3 3.32,6.3 ; 5.68,4.95 5.68,10.95 6.32,10.95 6.32,4.95 ; 5.68,6.3 6.32,6.3 ; 8.68,4.95 8.68,10.95 9.32,10.95 9.32,4.95 ; 8.68,6.3 9.32,6.3 ; -12.35,-4.95 -12.35,4.95 12.35,4.95 12.35,-4.95 -12.35,-4.95
Top Courtyard:
  lines w0.05: -13.11,-5.225 13.11,-5.225 13.11,11.41 -13.11,11.41 -13.11,-5.225
Top Component Center:
  lines w0.05: -0.5,0 0.5,0 ; 0,-0.5 0,0.5
3D body "662014230822.stp": height 8.78, standoff -3.08, extent -12.35,-4.95 12.35,10.95

## 662014231722 [mm] "3.00mm SMT Male Dual Row Angled Header with SMT Solder Tab, 14p"
height 8.26
pads (16):
  rect 1.27x2.92 smd: 1(9,5.13) 2(6,5.13) 3(3,5.13) 4(0,5.13) 5(-3,5.13) 6(-6,5.13) 7(-9,5.13) 8(9,9.75) 9(6,9.75) 10(3,9.75) 11(0,9.75) 12(-3,9.75) 13(-6,9.75) 14(-9,9.75)
  rect 3.43x1.65 smd: MP1(-12.895,-0.35) MP2(12.895,-0.35)
Top Overlay:
  circle w0.25: c10.25,5.625 r0.125
  lines w0.2: -12.5,-1.475 -12.5,-5.025 12.5,-5.025 12.5,-1.475 ; -12.5,0.775 -12.5,5.025 -9.95,5.025 ; 9.95,5.025 12.5,5.025 12.5,0.775
Top Designator:
  text ".Designator" at -7.498,-0.5 h1.5
Top Component Outline:
  lines w0.1: -12.35,-1.1 -14.05,-1.1 -14.05,0.4 -12.35,0.4 ; -9.32,4.95 -9.32,10.95 -8.68,10.95 -8.68,4.95 ; -9.32,6.3 -8.68,6.3 ; -6.32,4.95 -6.32,10.95 -5.68,10.95 -5.68,4.95 ; -6.32,6.3 -5.68,6.3 ; -3.32,4.95 -3.32,10.95 -2.68,10.95 -2.68,4.95 ; -3.32,6.3 -2.68,6.3 ; -0.32,4.95 -0.32,10.95 0.32,10.95 0.32,4.95 ; -0.32,6.3 0.32,6.3 ; 2.68,4.95 2.68,10.95 3.32,10.95 3.32,4.95 ; 2.68,6.3 3.32,6.3 ; 5.68,4.95 5.68,10.95 6.32,10.95 6.32,4.95 ; 5.68,6.3 6.32,6.3 ; 8.68,4.95 8.68,10.95 9.32,10.95 9.32,4.95 ; 8.68,6.3 9.32,6.3 ; 12.35,-1.1 14.05,-1.1 14.05,0.4 12.35,0.4 ; -12.35,-4.95 -12.35,4.95 12.35,4.95 12.35,-4.95 -12.35,-4.95
Top 3D Body:
  lines w0.1: -12.35,-1.1 -14.05,-1.1 -14.05,0.4 -12.35,0.4 ; -9.32,4.95 -9.32,10.95 -8.68,10.95 -8.68,4.95 ; -9.32,6.3 -8.68,6.3 ; -6.32,4.95 -6.32,10.95 -5.68,10.95 -5.68,4.95 ; -6.32,6.3 -5.68,6.3 ; -3.32,4.95 -3.32,10.95 -2.68,10.95 -2.68,4.95 ; -3.32,6.3 -2.68,6.3 ; -0.32,4.95 -0.32,10.95 0.32,10.95 0.32,4.95 ; -0.32,6.3 0.32,6.3 ; 2.68,4.95 2.68,10.95 3.32,10.95 3.32,4.95 ; 2.68,6.3 3.32,6.3 ; 5.68,4.95 5.68,10.95 6.32,10.95 6.32,4.95 ; 5.68,6.3 6.32,6.3 ; 8.68,4.95 8.68,10.95 9.32,10.95 9.32,4.95 ; 8.68,6.3 9.32,6.3 ; 12.35,-1.1 14.05,-1.1 14.05,0.4 12.35,0.4 ; -12.35,-4.95 12.35,-4.95 12.35,4.95 -12.35,4.95 -12.35,-4.95
Top Courtyard:
  lines w0.05: -14.81,-5.225 14.81,-5.225 14.81,11.41 -14.81,11.41 -14.81,-5.225
Top Component Center:
  lines w0.05: -0.5,0 0.5,0 ; 0,-0.5 0,0.5
3D body "662014231722.stp": height 8.79, standoff 0.03, extent -14.05,-4.95 14.05,10.95

## 662014231822 [mm] "3.00mm SMT Male Dual Row Vertical Header with SMT Solder Tab, 14p"
height 9.9
pads (16):
  rect 1.27x2.54 smd: 1(9,-4.7) 2(6,-4.7) 3(3,-4.7) 4(0,-4.7) 5(-3,-4.7) 6(-6,-4.7) 7(-9,-4.7) 8(9,4.7) 9(6,4.7) 10(3,4.7) 11(0,4.7) 12(-3,4.7) 13(-6,4.7) 14(-9,4.7)
  rect 3.43x1.65 smd: MP1(-12.895,0) MP2(12.895,0)
Top Overlay:
  circle w0.25: c10.25,-4.625 r0.125
  lines w0.2: -12.5,-1.155 -12.5,-3.755 -9.95,-3.755 ; -12.5,1.155 -12.5,3.755 -9.95,3.755 ; 9.95,-3.755 12.5,-3.755 12.5,-1.155 ; 9.95,3.755 12.5,3.755 12.5,1.155
Top Designator:
  text ".Designator" at -7.498,-0.5 h1.5
Top Component Outline:
  lines w0.1: -12.35,-0.75 -14.6,-0.75 -14.6,0.75 -12.35,0.75 ; -9.32,-3.68 -9.32,-5.698 -8.68,-5.698 -8.68,-3.68 ; -9.32,3.68 -9.32,5.698 -8.68,5.698 -8.68,3.68 ; -6.32,-3.68 -6.32,-5.698 -5.68,-5.698 -5.68,-3.68 ; -6.32,3.68 -6.32,5.698 -5.68,5.698 -5.68,3.68 ; -3.32,-3.68 -3.32,-5.698 -2.68,-5.698 -2.68,-3.68 ; -3.32,3.68 -3.32,5.698 -2.68,5.698 -2.68,3.68 ; -0.7,3.68 -0.7,5.08 0.7,5.08 0.7,3.68 ; -0.32,-3.68 -0.32,-5.698 0.32,-5.698 0.32,-3.68 ; -0.32,3.68 -0.32,5.698 0.32,5.698 0.32,3.68 ; 2.68,-3.68 2.68,-5.698 3.32,-5.698 3.32,-3.68 ; 2.68,3.68 2.68,5.698 3.32,5.698 3.32,3.68 ; 5.68,-3.68 5.68,-5.698 6.32,-5.698 6.32,-3.68 ; 5.68,3.68 5.68,5.698 6.32,5.698 6.32,3.68 ; 8.68,-3.68 8.68,-5.698 9.32,-5.698 9.32,-3.68 ; 8.68,3.68 8.68,5.698 9.32,5.698 9.32,3.68 ; 12.35,-0.75 14.6,-0.75 14.6,0.75 12.35,0.75 ; -12.35,-3.68 12.35,-3.68 12.35,3.68 -12.35,3.68 -12.35,-3.68
Top 3D Body:
  lines w0.1: -12.35,-0.75 -14.6,-0.75 -14.6,0.75 -12.35,0.75 ; -9.32,-3.68 -9.32,-5.698 -8.68,-5.698 -8.68,-3.68 ; -9.32,3.68 -9.32,5.698 -8.68,5.698 -8.68,3.68 ; -6.32,-3.68 -6.32,-5.698 -5.68,-5.698 -5.68,-3.68 ; -6.32,3.68 -6.32,5.698 -5.68,5.698 -5.68,3.68 ; -3.32,-3.68 -3.32,-5.698 -2.68,-5.698 -2.68,-3.68 ; -3.32,3.68 -3.32,5.698 -2.68,5.698 -2.68,3.68 ; -0.7,3.68 -0.7,5.08 0.7,5.08 0.7,3.68 ; -0.32,-3.68 -0.32,-5.698 0.32,-5.698 0.32,-3.68 ; -0.32,3.68 -0.32,5.698 0.32,5.698 0.32,3.68 ; 2.68,-3.68 2.68,-5.698 3.32,-5.698 3.32,-3.68 ; 2.68,3.68 2.68,5.698 3.32,5.698 3.32,3.68 ; 5.68,-3.68 5.68,-5.698 6.32,-5.698 6.32,-3.68 ; 5.68,3.68 5.68,5.698 6.32,5.698 6.32,3.68 ; 8.68,-3.68 8.68,-5.698 9.32,-5.698 9.32,-3.68 ; 8.68,3.68 8.68,5.698 9.32,5.698 9.32,3.68 ; 12.35,-0.75 14.6,-0.75 14.6,0.75 12.35,0.75 ; -12.35,-3.68 -12.35,3.68 12.35,3.68 12.35,-3.68 -12.35,-3.68
Top Courtyard:
  lines w0.05: -14.81,-6.17 14.81,-6.17 14.81,6.17 -14.81,6.17 -14.81,-6.17
Top Component Center:
  lines w0.05: -0.5,0 0.5,0 ; 0,-0.5 0,0.5
3D body "662014231822.stp": height 9.93, standoff 0.03, extent -14.6,-5.698 14.6,5.698

## 662014235922 [mm] "Dual row SMT Vertical header With TH metal clip 14p"
height 9.9
pads (16):
  rect 1.27x2.54 smd: 1(9,-4.57) 2(6,-4.57) 3(3,-4.57) 4(0,-4.57) 5(-3,-4.57) 6(-6,-4.57) 7(-9,-4.57) 8(9,4.83) 9(6,4.83) 10(3,4.83) 11(0,4.83) 12(-3,4.83) 13(-6,4.83) 14(-9,4.83)
  round 3.5 hole 2.41: MH1(-11.16,0.13) MH2(11.16,0.13)
Top Overlay:
  circle w0.25: c10.3,-4.4 r0.125
  lines w0.2: -12.5,-1.405 -12.5,-3.755 -9.95,-3.755 ; -12.5,1.665 -12.5,3.755 -9.95,3.755 ; 9.95,-3.755 12.5,-3.755 12.5,-1.405 ; 9.95,3.755 12.5,3.755 12.5,1.665
Top Designator:
  text ".Designator" at -7.498,-0.5 h1.5
Top Component Outline:
  lines w0.1: -9.32,-3.68 -9.32,-5.5 -8.68,-5.5 -8.68,-3.68 ; -9.32,3.68 -9.32,5.9 -8.68,5.9 -8.68,3.68 ; -6.32,-3.68 -6.32,-5.5 -5.68,-5.5 -5.68,-3.68 ; -6.32,3.68 -6.32,5.9 -5.68,5.9 -5.68,3.68 ; -3.32,-3.68 -3.32,-5.5 -2.68,-5.5 -2.68,-3.68 ; -3.32,3.68 -3.32,5.9 -2.68,5.9 -2.68,3.68 ; -0.7,3.68 -0.7,5.08 0.7,5.08 0.7,3.68 ; -0.32,-3.68 -0.32,-5.5 0.32,-5.5 0.32,-3.68 ; -0.32,3.68 -0.32,5.9 0.32,5.9 0.32,3.68 ; 2.68,-3.68 2.68,-5.5 3.32,-5.5 3.32,-3.68 ; 2.68,3.68 2.68,5.9 3.32,5.9 3.32,3.68 ; 5.68,-3.68 5.68,-5.5 6.32,-5.5 6.32,-3.68 ; 5.68,3.68 5.68,5.9 6.32,5.9 6.32,3.68 ; 8.68,-3.68 8.68,-5.5 9.32,-5.5 9.32,-3.68 ; 8.68,3.68 8.68,5.9 9.32,5.9 9.32,3.68 ; -12.35,-3.68 -12.35,3.68 12.35,3.68 12.35,-3.68 -12.35,-3.68
Top 3D Body:
  lines w0.1: -9.32,-3.68 -9.32,-5.5 -8.68,-5.5 -8.68,-3.68 ; -9.32,3.68 -9.32,5.9 -8.68,5.9 -8.68,3.68 ; -6.32,-3.68 -6.32,-5.5 -5.68,-5.5 -5.68,-3.68 ; -6.32,3.68 -6.32,5.9 -5.68,5.9 -5.68,3.68 ; -3.32,-3.68 -3.32,-5.5 -2.68,-5.5 -2.68,-3.68 ; -3.32,3.68 -3.32,5.9 -2.68,5.9 -2.68,3.68 ; -0.7,3.68 -0.7,5.08 0.7,5.08 0.7,3.68 ; -0.32,-3.68 -0.32,-5.5 0.32,-5.5 0.32,-3.68 ; -0.32,3.68 -0.32,5.9 0.32,5.9 0.32,3.68 ; 2.68,-3.68 2.68,-5.5 3.32,-5.5 3.32,-3.68 ; 2.68,3.68 2.68,5.9 3.32,5.9 3.32,3.68 ; 5.68,-3.68 5.68,-5.5 6.32,-5.5 6.32,-3.68 ; 5.68,3.68 5.68,5.9 6.32,5.9 6.32,3.68 ; 8.68,-3.68 8.68,-5.5 9.32,-5.5 9.32,-3.68 ; 8.68,3.68 8.68,5.9 9.32,5.9 9.32,3.68 ; -12.35,-3.68 -12.35,3.68 12.35,3.68 12.35,-3.68 -12.35,-3.68
Top Courtyard:
  lines w0.05: -13.11,-6.04 -13.11,6.3 13.11,6.3 13.11,-6.04 -13.11,-6.04
Top Component Center:
  lines w0.05: -0.5,0 0.5,0 ; 0,-0.5 0,0.5
3D body "662014235922.stp": height 9.92, standoff -3.08, extent -12.35,-5.5 12.35,5.9

## 662014236022 [mm] "3.00mm SMT Male Dual Row Angled Header with Plastic Pegs, 14p"
height 8.26
pads (16):
  rect 1.27x2.92 smd: 1(9,5.13) 2(6,5.13) 3(3,5.13) 4(0,5.13) 5(-3,5.13) 6(-6,5.13) 7(-9,5.13) 8(9,9.75) 9(6,9.75) 10(3,9.75) 11(0,9.75) 12(-3,9.75) 13(-6,9.75) 14(-9,9.75)
  round 3 hole 3 unplated: MH1(-6.84,-0.35) MH2(6.84,-0.35)
Top Overlay:
  circle w0.4: c10.4,5.8 r0.2
  lines w0.2: -9.95,5.025 -12.5,5.025 -12.5,-5.025 12.5,-5.025 12.5,5.025 9.95,5.025
Top Designator:
  text ".Designator" at -7.498,-0.5 h1.5
Top Component Outline:
  lines w0.1: -9.32,4.95 -9.32,10.95 -8.68,10.95 -8.68,4.95 ; -9.32,6.3 -8.68,6.3 ; -6.32,4.95 -6.32,10.95 -5.68,10.95 -5.68,4.95 ; -6.32,6.3 -5.68,6.3 ; -3.32,4.95 -3.32,10.95 -2.68,10.95 -2.68,4.95 ; -3.32,6.3 -2.68,6.3 ; -0.32,4.95 -0.32,10.95 0.32,10.95 0.32,4.95 ; -0.32,6.3 0.32,6.3 ; 2.68,4.95 2.68,10.95 3.32,10.95 3.32,4.95 ; 2.68,6.3 3.32,6.3 ; 5.68,4.95 5.68,10.95 6.32,10.95 6.32,4.95 ; 5.68,6.3 6.32,6.3 ; 8.68,4.95 8.68,10.95 9.32,10.95 9.32,4.95 ; 8.68,6.3 9.32,6.3 ; -12.35,-4.95 -12.35,4.95 12.35,4.95 12.35,-4.95 -12.35,-4.95
Top 3D Body:
  lines w0.1: -9.32,4.95 -9.32,10.95 -8.68,10.95 -8.68,4.95 ; -9.32,6.3 -8.68,6.3 ; -6.32,4.95 -6.32,10.95 -5.68,10.95 -5.68,4.95 ; -6.32,6.3 -5.68,6.3 ; -3.32,4.95 -3.32,10.95 -2.68,10.95 -2.68,4.95 ; -3.32,6.3 -2.68,6.3 ; -0.32,4.95 -0.32,10.95 0.32,10.95 0.32,4.95 ; -0.32,6.3 0.32,6.3 ; 2.68,4.95 2.68,10.95 3.32,10.95 3.32,4.95 ; 2.68,6.3 3.32,6.3 ; 5.68,4.95 5.68,10.95 6.32,10.95 6.32,4.95 ; 5.68,6.3 6.32,6.3 ; 8.68,4.95 8.68,10.95 9.32,10.95 9.32,4.95 ; 8.68,6.3 9.32,6.3 ; -12.35,-4.95 -12.35,4.95 12.35,4.95 12.35,-4.95 -12.35,-4.95
Top Courtyard:
  lines w0.05: -12.7,-5.225 -12.7,11.41 12.7,11.41 12.7,-5.225 -12.7,-5.225
Top Component Center:
  lines w0.05: -0.5,0 0.5,0 ; 0,-0.5 0,0.5
3D body "662014236022.stp": height 8.79, standoff -3.17, extent -12.35,-4.95 12.35,10.95

## 662016230822 [mm] "Dual row SMT Right angle header With TH Metal Clip 16p"
height 8.76
pads (18):
  rect 1.27x2.92 smd: 1(10.5,5.13) 2(7.5,5.13) 3(4.5,5.13) 4(1.5,5.13) 5(-1.5,5.13) 6(-4.5,5.13) 7(-7.5,5.13) 8(-10.5,5.13) 9(10.5,9.75) 10(7.5,9.75) 11(4.5,9.75) 12(1.5,9.75) 13(-1.5,9.75) 14(-4.5,9.75) 15(-7.5,9.75) 16(-10.5,9.75)
  round 3.5 hole 2.41: MH1(-12.66,-0.35) MH2(12.66,-0.35)
Top Overlay:
  circle w0.25: c11.75,5.625 r0.125
  lines w0.2: -14,-1.925 -14,-5.025 14,-5.025 14,-1.925 ; -14,1.225 -14,5.025 -11.45,5.025 ; 11.45,5.025 14,5.025 14,1.225
Top Designator:
  text ".Designator" at -7.498,-0.5 h1.5
Top Component Outline:
  lines w0.1: -10.82,4.95 -10.82,10.95 -10.18,10.95 -10.18,4.95 ; -10.82,6.3 -10.18,6.3 ; -7.82,4.95 -7.82,10.95 -7.18,10.95 -7.18,4.95 ; -7.82,6.3 -7.18,6.3 ; -4.82,4.95 -4.82,10.95 -4.18,10.95 -4.18,4.95 ; -4.82,6.3 -4.18,6.3 ; -1.82,4.95 -1.82,10.95 -1.18,10.95 -1.18,4.95 ; -1.82,6.3 -1.18,6.3 ; 1.18,4.95 1.18,10.95 1.82,10.95 1.82,4.95 ; 1.18,6.3 1.82,6.3 ; 4.18,4.95 4.18,10.95 4.82,10.95 4.82,4.95 ; 4.18,6.3 4.82,6.3 ; 7.18,4.95 7.18,10.95 7.82,10.95 7.82,4.95 ; 7.18,6.3 7.82,6.3 ; 10.18,4.95 10.18,10.95 10.82,10.95 10.82,4.95 ; 10.18,6.3 10.82,6.3 ; -13.85,-4.95 -13.85,4.95 13.85,4.95 13.85,-4.95 -13.85,-4.95
Top 3D Body:
  lines w0.1: -10.82,4.95 -10.82,10.95 -10.18,10.95 -10.18,4.95 ; -10.82,6.3 -10.18,6.3 ; -7.82,4.95 -7.82,10.95 -7.18,10.95 -7.18,4.95 ; -7.82,6.3 -7.18,6.3 ; -4.82,4.95 -4.82,10.95 -4.18,10.95 -4.18,4.95 ; -4.82,6.3 -4.18,6.3 ; -1.82,4.95 -1.82,10.95 -1.18,10.95 -1.18,4.95 ; -1.82,6.3 -1.18,6.3 ; 1.18,4.95 1.18,10.95 1.82,10.95 1.82,4.95 ; 1.18,6.3 1.82,6.3 ; 4.18,4.95 4.18,10.95 4.82,10.95 4.82,4.95 ; 4.18,6.3 4.82,6.3 ; 7.18,4.95 7.18,10.95 7.82,10.95 7.82,4.95 ; 7.18,6.3 7.82,6.3 ; 10.18,4.95 10.18,10.95 10.82,10.95 10.82,4.95 ; 10.18,6.3 10.82,6.3 ; -13.85,-4.95 -13.85,4.95 13.85,4.95 13.85,-4.95 -13.85,-4.95
Top Courtyard:
  lines w0.05: -14.61,-5.225 14.61,-5.225 14.61,11.41 -14.61,11.41 -14.61,-5.225
Top Component Center:
  lines w0.05: -0.5,0 0.5,0 ; 0,-0.5 0,0.5
3D body "662016230822.stp": height 8.78, standoff -3.08, extent -13.85,-4.95 13.85,10.95